# Altium footprint library LimeMicroAltiumLib.PcbLib: 876 footprints (part 39 of 57)
Each footprint in its own frame and in the unit in brackets; x right, y up, seen from the top. Pads: shape width x height; smd on the part's side, far side on the other; paste and mask are expansions set on the pad; w line width, h text height; cw(c..) or ccw(c..) is an arc to the next point about the centre after c.
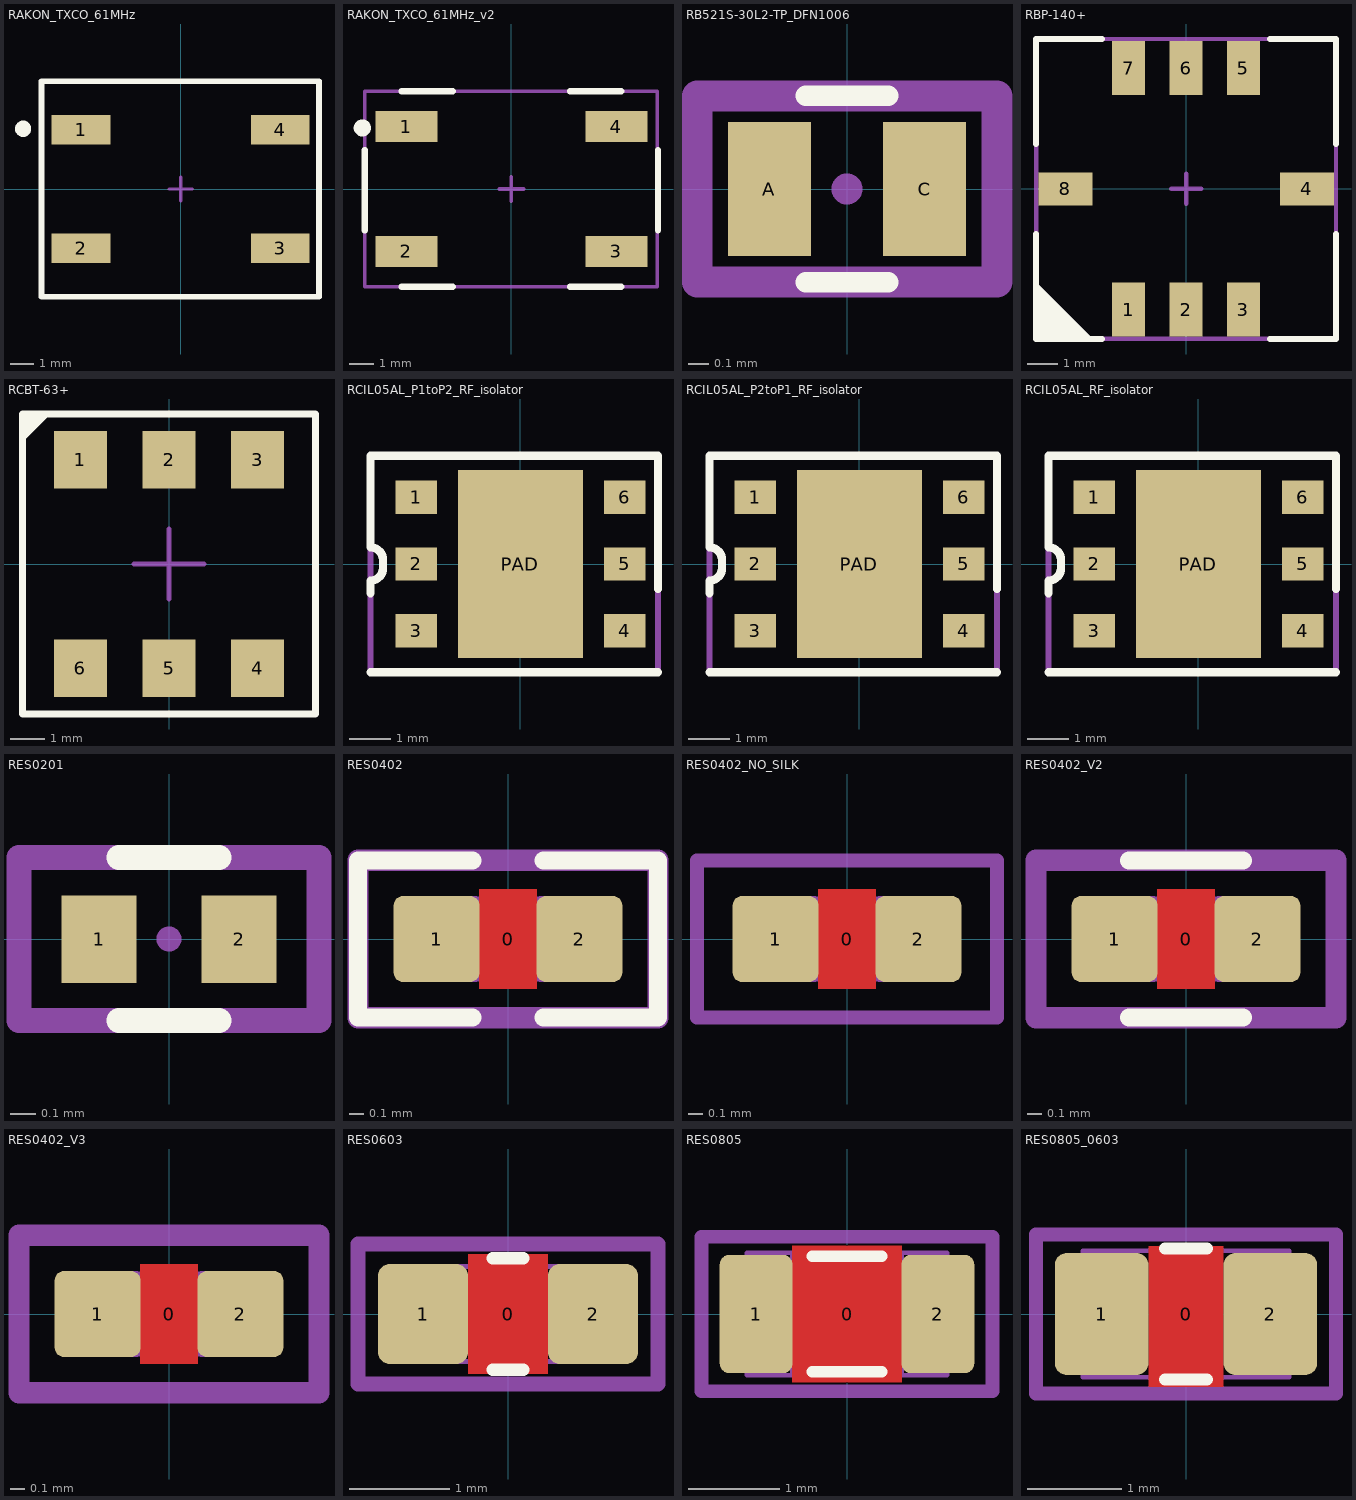
[diagram p38: the footprints below, top view; thin cyan lines are the x and y axes]

## RAKON_TXCO_61MHz [mm] "61.44 MHz"
pads (4):
  rect 2.54x1.27 smd: 1(-4.3,2.55) 2(-4.3,-2.55) 3(4.3,-2.55) 4(4.3,2.55)
Top Overlay:
  circle w0.35: c-6.8,2.6 r0.177
  lines w0.254: -6,-4.65 -6,4.65 5.975,4.65 5.975,-4.65 -6,-4.65
Mechanical 15:
  circle w0.35: c-4.225,2.55 r0.158
  lines w0.15: -0.5,0 0.5,0 ; 0,-0.5 0,0.5 ; -6,-4.65 5.975,-4.65 5.975,4.65 -6,4.65 -6,-4.65
  text ".Designator" at 0,0 h0.55
3D body: height 0.1, standoff 0, extent -5.8,2.5 -5.7,2.6
3D body: height 0.1, standoff 0, extent -0.5,-4 0,-3.8

## RAKON_TXCO_61MHz_v2 [mm] "61.44 MHz"
pads (4):
  rect 2.54x1.27 smd: 1(-4.3,2.55) 2(-4.3,-2.55) 3(4.3,-2.55) 4(4.3,2.55)
Top Overlay:
  circle w0.35: c-6.1,2.5 r0.177
  lines w0.254: -6,-1.7 -6,1.6 ; -4.5,-4 -2.4,-4 ; -4.5,4 -2.4,4 ; 2.4,-4 4.5,-4 ; 2.4,4 4.5,4 ; 6,-1.7 6,1.6
Mechanical 15:
  circle w0.35: c-4.225,2.55 r0.158
  lines w0.15: -0.5,0 0.5,0 ; 0,-0.5 0,0.5 ; -6,-4 5.975,-4 5.975,4 -6,4 -6,-4
  text ".Designator" at 0,0 h0.55
3D body: height 0.1, standoff 0, extent -5.8,2.5 -5.7,2.6
3D body: height 0.1, standoff 0, extent -0.5,-4 0,-3.8

## RB521S-30L2-TP_DFN1006 [mm]
pads (2):
  rect 0.4x0.65 smd mask+0.05: A(-0.375,0) C(0.375,0)
Top Overlay:
  lines w0.1: -0.2,-0.45 0.2,-0.45 ; -0.2,0.45 0.2,0.45
Mechanical 15:
  circle w0.1: c0,0 r0.025
  lines w0.15: -0.725,-0.45 0.725,-0.45 0.725,0.45 -0.725,0.45 -0.725,-0.45
  text "C" at 0.275,-0.175 h0.4
  text "A" at -0.525,-0.175 h0.4
  text ".Designator" at 0,0 h0.55
3D body "User Library-DFN1006-2.step": height 0.48, standoff -0.02, extent -0.5,-0.3 0.5,0.3

## RBP-140+ [mm] "saw filter, case style GP731"
pads (8):
  rect 1.1x1.8 smd mask+0.05: 1(-1.91,-4.025) 2(0,-4.025) 3(1.91,-4.025) 5(1.91,4.025) 6(0,4.025) 7(-1.91,4.025)
  rect 1.8x1.1 smd mask+0.05: 4(4.025,0) 8(-4.025,0)
Top Overlay:
  region: -3.1,-5 -5,-3.1 -5,-5
  lines w0.2: -5,-1.5 -5,-5 -2.8,-5 ; -5,1.5 -5,5 -2.8,5 ; 2.8,-5 5,-5 5,-1.5 ; 2.8,5 5,5 5,1.5
Mechanical 15:
  circle w0.25: c-2,-4 r0.1
  lines w0.15: -0.5,0 0.5,0 ; 0,-0.5 0,0.5 ; -5,-5 5,-5 5,5 -5,5 -5,-5
  text ".Designator" at 0,0 h0.55
3D body "User Library-RBP-275+.step": height 2.54, standoff 0, extent -4.455,-4.455 4.455,4.464

## RCBT-63+ [mm]
pads (6):
  rect 1.52x1.65 smd: 1(-2.54,2.985) 2(0,2.985) 3(2.54,2.985) 4(2.54,-2.985) 5(0,-2.985) 6(-2.54,-2.985)
Top Overlay:
  region: -4.2,3.6 -4.2,4.3 -3.5,4.3
  lines w0.15: -4.2,4.3 -4.2,3.6 -3.5,4.3
  lines w0.2: -4.2,-4.3 4.2,-4.3 4.2,4.3 -4.2,4.3 -4.2,-4.3
Mechanical 15:
  lines w0.15: -1,0 0,0 ; 0,-1 0,0 ; 0,1 0,0 ; 1,0 0,0 ; -4.2,-4.3 -4.2,4.3 4.2,4.3 4.2,-4.3 -4.2,-4.3
  text "6" at -2.8,-3.5 h0.55
  text "1" at -2.7,2.5 h0.55
  text ".Designator" at 0,0 h0.55
3D body "User Library-RLM 751.step": height 4.09, standoff -0.03, extent -3.935,-3.175 3.935,3.175

## RCIL05AL_P1toP2_RF_isolator [mm]
pads (7):
  rect 1x0.8 smd mask+0.05: 1(-2.5,1.6) 2(-2.5,0) 3(-2.5,-1.6) 4(2.5,-1.6) 5(2.5,0) 6(2.5,1.6)
  rect 3x4.5 smd mask+0.05: PAD(0,0)
Top Overlay:
  lines w0.2: -3.6,-2.6 3.3,-2.6 ; -3.6,-0.7 -3.6,-0.4 ccw(c-3.6,-0.1) -3.3,-0.1 -3.3,0.1 ccw(c-3.6,0.1) -3.6,0.4 -3.6,2.6 3.3,2.6 3.3,-0.6
Mechanical 15:
  lines w0.15: -0.9,-1.5 0.75,-1.5 ; -0.5,0 0.5,0 ; 0,-0.5 0,0.5 ; 0.25,-1.75 0.75,-1.5 ; 0.25,-1.25 0.75,-1.5 ; -3.6,-2.6 -3.6,2.6 3.3,2.6 3.3,-2.6 -3.6,-2.6
  text ".Designator" at 0,0 h0.55
  text "G" at -1.9,1.3 h0.55
  text "G" at -1.9,-0.3 h0.55
  text "P1" at -1.9,-1.8 h0.55
  text "P2" at 1,-1.8 h0.55
  text "G" at 1.5,-0.3 h0.55
  text "G" at 1.5,1.3 h0.55
3D body: height 2.3, standoff 0, extent -2.5,-2.5 2.5,2.5

## RCIL05AL_P2toP1_RF_isolator [mm]
pads (7):
  rect 1x0.8 smd mask+0.05: 1(-2.5,1.6) 2(-2.5,0) 3(-2.5,-1.6) 4(2.5,-1.6) 5(2.5,0) 6(2.5,1.6)
  rect 3x4.5 smd mask+0.05: PAD(0,0)
Top Overlay:
  lines w0.2: -3.6,-2.6 3.3,-2.6 ; -3.6,-0.7 -3.6,-0.4 ccw(c-3.6,-0.1) -3.3,-0.1 -3.3,0.1 ccw(c-3.6,0.1) -3.6,0.4 -3.6,2.6 3.3,2.6 3.3,-0.6
Mechanical 15:
  lines w0.15: -0.5,0 0.5,0 ; -0.4,-1.75 -0.9,-1.5 ; -0.4,-1.25 -0.9,-1.5 ; 0,-0.5 0,0.5 ; 0.75,-1.5 -0.9,-1.5 ; -3.6,-2.6 -3.6,2.6 3.3,2.6 3.3,-2.6 -3.6,-2.6
  text ".Designator" at 0,0 h0.55
  text "G" at -1.9,1.3 h0.55
  text "G" at -1.9,-0.3 h0.55
  text "P1" at -1.9,-1.8 h0.55
  text "P2" at 1,-1.8 h0.55
  text "G" at 1.5,-0.3 h0.55
  text "G" at 1.5,1.3 h0.55
3D body: height 2.3, standoff 0, extent -2.5,-2.575 2.5,2.575

## RCIL05AL_RF_isolator [mm]
pads (7):
  rect 1x0.8 smd mask+0.05: 1(-2.5,1.6) 2(-2.5,0) 3(-2.5,-1.6) 4(2.5,-1.6) 5(2.5,0) 6(2.5,1.6)
  rect 3x4.5 smd mask+0.05: PAD(0,0)
Top Overlay:
  lines w0.2: -3.6,-2.6 3.3,-2.6 ; -3.6,-0.7 -3.6,-0.4 ccw(c-3.6,-0.1) -3.3,-0.1 -3.3,0.1 ccw(c-3.6,0.1) -3.6,0.4 -3.6,2.6 3.3,2.6 3.3,-0.6
Mechanical 15:
  lines w0.15: -0.5,0 0.5,0 ; 0,-0.5 0,0.5 ; -3.6,-2.6 3.3,-2.6 3.3,2.6 -3.6,2.6 -3.6,-2.6
  text "G" at 1.5,1.3 h0.55
  text "G" at 1.5,-0.3 h0.55
  text "P2" at 1,-1.8 h0.55
  text "P1" at -1.9,-1.8 h0.55
  text "G" at -1.9,-0.3 h0.55
  text "G" at -1.9,1.3 h0.55
  text ".Designator" at 0,0 h0.55
3D body: height 2.3, standoff 0, extent -2.5,-2.5 2.5,2.5

## RES0201 [mm]
pads (2):
  rect 0.3x0.35 smd mask+0.05: 1(-0.28,0) 2(0.28,0)
Top Overlay:
  lines w0.1: -0.2,-0.325 0.2,-0.325 ; -0.2,0.325 0.2,0.325
Mechanical 15:
  circle w0.05: c0,0 r0.025
  lines w0.1: -0.6,-0.325 0.6,-0.325 0.6,0.325 -0.6,0.325 -0.6,-0.325
  text ".Designator" at 0.025,0 h0.55
3D body: height 0.25, standoff 0, extent -0.17,-0.15 0.17,0.15
3D body: height 0.25, standoff 0, extent -0.3,-0.15 -0.17,0.15
3D body: height 0.25, standoff 0, extent 0.17,-0.15 0.3,0.15

## RES0402 [mm] "Chip Resistor, Body 1.0x0.5mm, EIA 0402, IPC Medium Density"
height 0.4
pads (3):
  round 0.2 on Mech15: 0(0,0)
  rrect20% 0.6x0.6 smd: 1(-0.5,0) 2(0.5,0)
Top Layer:
  pour cut-out: -0.2,0.35 0.2,0.35 0.2,-0.35 -0.2,-0.35
Top Overlay:
  lines w0.127: -0.25,-0.55 -1.05,-0.55 -1.05,0.55 -0.25,0.55 ; 0.25,-0.55 1.05,-0.55 1.05,0.55 0.25,0.55
Mechanical 13:
  lines w0.05: 0.225,-0.274 -0.225,-0.274 0.225,-0.274 ; -0.525,-0.275 -0.525,0.275 -0.225,0.275 -0.225,-0.275 -0.525,-0.275 ; -0.225,0.274 0.225,0.274 -0.225,0.274 ; 0.225,-0.275 0.525,-0.275 0.525,0.275 0.225,0.275 0.225,-0.275
Mechanical 15:
  lines w0.15: -1.05,-0.55 -1.05,0.55 1.05,0.55 1.05,-0.55 -1.05,-0.55
  text ".Designator" at 0,0 h0.55
3D body "RES 0402 (1005 metric).STEP": height 0.4, standoff 0, extent -0.525,-0.275 0.525,0.275

## RES0402_NO_SILK [mm] "Chip Resistor, Body 1.0x0.5mm, EIA 0402, IPC Medium Density"
height 0.4
pads (3):
  round 0.2 on Mech15: 0(0,0)
  rrect20% 0.6x0.6 smd: 1(-0.5,0) 2(0.5,0)
Top Layer:
  pour cut-out: -0.2,0.35 0.2,0.35 0.2,-0.35 -0.2,-0.35
Mechanical 13:
  lines w0.05: 0.225,-0.274 -0.225,-0.274 0.225,-0.274 ; -0.525,-0.275 -0.225,-0.275 -0.225,0.275 -0.525,0.275 -0.525,-0.275 ; -0.225,0.274 0.225,0.274 -0.225,0.274 ; 0.225,-0.275 0.225,0.275 0.525,0.275 0.525,-0.275 0.225,-0.275
Mechanical 15:
  lines w0.1: -1.05,-0.55 1.05,-0.55 1.05,0.55 -1.05,0.55 -1.05,-0.55
  text ".Designator" at 0,0 h0.55
3D body "RES 0402 (1005 metric).STEP": height 0.4, standoff 0, extent -0.525,-0.275 0.525,0.275

## RES0402_V2 [mm] "Chip Resistor, Body 1.0x0.5mm, EIA 0402, IPC Medium Density"
height 0.4
pads (3):
  round 0.2 on Mech15: 0(0,0)
  rrect20% 0.6x0.6 smd: 1(-0.5,0) 2(0.5,0)
Top Layer:
  pour cut-out: -0.2,0.35 0.2,0.35 0.2,-0.35 -0.2,-0.35
Top Overlay:
  lines w0.127: -0.4,-0.55 0.4,-0.55 ; -0.4,0.55 0.4,0.55
Mechanical 13:
  lines w0.05: 0.225,-0.274 -0.225,-0.274 0.225,-0.274 ; -0.525,-0.275 -0.225,-0.275 -0.225,0.275 -0.525,0.275 -0.525,-0.275 ; -0.225,0.274 0.225,0.274 -0.225,0.274 ; 0.225,-0.275 0.225,0.275 0.525,0.275 0.525,-0.275 0.225,-0.275
Mechanical 15:
  lines w0.15: -1.05,-0.55 1.05,-0.55 1.05,0.55 -1.05,0.55 -1.05,-0.55
  text ".Designator" at 0,0 h0.55
3D body "RES 0402 (1005 metric).STEP": height 0.4, standoff 0, extent -0.525,-0.275 0.525,0.275

## RES0402_V3 [mm] "Chip Resistor, Body 1.0x0.5mm, EIA 0402, IPC Medium Density"
height 0.4
pads (3):
  round 0.2 on Mech15: 0(0,0)
  rrect20% 0.6x0.6 smd: 1(-0.5,0) 2(0.5,0)
Top Layer:
  pour cut-out: -0.2,0.35 0.2,0.35 0.2,-0.35 -0.2,-0.35
Mechanical 13:
  lines w0.05: 0.225,-0.274 -0.225,-0.274 0.225,-0.274 ; -0.525,-0.275 -0.525,0.275 -0.225,0.275 -0.225,-0.275 -0.525,-0.275 ; -0.225,0.274 0.225,0.274 -0.225,0.274 ; 0.225,-0.275 0.525,-0.275 0.525,0.275 0.225,0.275 0.225,-0.275
Mechanical 15:
  lines w0.15: -1.05,-0.55 -1.05,0.55 1.05,0.55 1.05,-0.55 -1.05,-0.55
  text ".Designator" at 0,0 h0.55
3D body "RES 0402 (1005 metric).STEP": height 0.4, standoff 0, extent -0.525,-0.275 0.525,0.275

## RES0603 [mm] "Chip Resistor, Body 1.6x0.8mm, 0603, IPC Medium Density"
height 0.55
pads (3):
  round 0.254 on Mech15: 0(0,0)
  rrect25% 0.9x1 smd: 1(-0.85,0) 2(0.85,0)
Top Layer:
  pour cut-out: -0.4,0.6 0.4,0.6 0.4,-0.6 -0.4,-0.6
Top Overlay:
  lines w0.127: -0.152,-0.556 0.152,-0.556 ; -0.152,0.556 0.152,0.556
Mechanical 13:
  lines w0.05: -0.875,-0.475 -0.475,-0.475 -0.475,0.475 -0.875,0.475 -0.875,-0.475 ; -0.475,-0.474 0.475,-0.474 -0.475,-0.474 ; -0.475,0.474 0.475,0.474 -0.475,0.474 ; 0.475,-0.475 0.475,0.475 0.875,0.475 0.875,-0.475 0.475,-0.475
Mechanical 15:
  lines w0.15: -1.5,-0.7 -1.5,0.7 1.5,0.7 1.5,-0.7 -1.5,-0.7
  text ".Designator" at 0,0 h0.55
3D body "RES 0603 (1608 metric).STEP": height 0.54, standoff -0.01, extent -0.875,-0.475 0.875,0.475

## RES0805 [mm] "Chip Resistor, Body 2.0x1.2mm, 0805, IPC Medium Density"
height 0.7
pads (3):
  round 0.254 on Mech15: 0(0,0)
  rrect25% 0.8x1.3 smd: 1(-1,0) 2(1,0)
Top Layer:
  pour cut-out: -0.6,0.75 0.6,0.75 0.6,-0.75 -0.6,-0.75
Top Overlay:
  lines w0.127: -0.381,-0.635 0.381,-0.635 ; -0.381,0.635 0.381,0.635
Mechanical 13:
  lines w0.05: 0.6,-0.674 -0.6,-0.674 ; -0.6,-0.674 0.6,-0.674 ; -0.6,-0.675 -1.1,-0.675 -1.1,0.675 -0.6,0.675 -0.6,-0.675 ; 0.6,-0.675 1.1,-0.675 1.1,0.675 0.6,0.675 ; 0.6,-0.675 0.6,0.675 ; 0.6,0.674 -0.6,0.674 0.6,0.674
Mechanical 15:
  lines w0.15: -1.6,-0.85 -1.6,0.85 1.6,0.85 1.6,-0.85 -1.6,-0.85
  text ".Designator" at 0,0 h0.55
3D body "RES 0805 (2012 metric).STEP": height 0.69, standoff -0.01, extent -1.1,-0.675 1.1,0.675

## RES0805_0603 [mm] "Universal 0805 0603 footprint"
height 0.7
pads (3):
  round 0.254 on Mech15: 0(0,0)
  rrect25% 1x1.3 smd: 1(-0.9,0) 2(0.9,0)
Top Layer:
  pour cut-out: -0.4,0.725 0.4,0.725 0.4,-0.775 -0.4,-0.775
Top Overlay:
  lines w0.127: -0.225,-0.7 0.225,-0.7 ; -0.225,0.7 0.225,0.7
Mechanical 13:
  lines w0.05: 0.6,-0.674 -0.6,-0.674 ; -0.6,-0.675 -0.6,0.675 -1.1,0.675 -1.1,-0.675 -0.6,-0.675 ; -0.6,-0.674 0.6,-0.674 ; 0.6,-0.675 0.6,0.675 ; 0.6,-0.675 1.1,-0.675 1.1,0.675 0.6,0.675 ; 0.6,0.674 -0.6,0.674 0.6,0.674
Mechanical 15:
  lines w0.15: -1.6,-0.85 1.6,-0.85 1.6,0.85 -1.6,0.85 -1.6,-0.85
  text ".Designator" at 0,0 h0.55
3D body "RES 0805 (2012 metric).STEP": height 0.69, standoff -0.01, extent -1.1,-0.675 1.1,0.675